# EAGLE library part MCP2515-TJA1050-MODULE (library moto-edge-hil)
MCP2515-TJA1050-MODULE MCP2515 + TJA1050 SPI CAN karti (8 MHz kristal). TJA1050 5V: Pi 3.3V SPI icin seviye dikkat. Kart: 40.0 x 28.0 mm - Guven: M STEP: GrabCAD 'MCP2515 CAN module' NOT: J1 jumper = 120R sonlandirma.
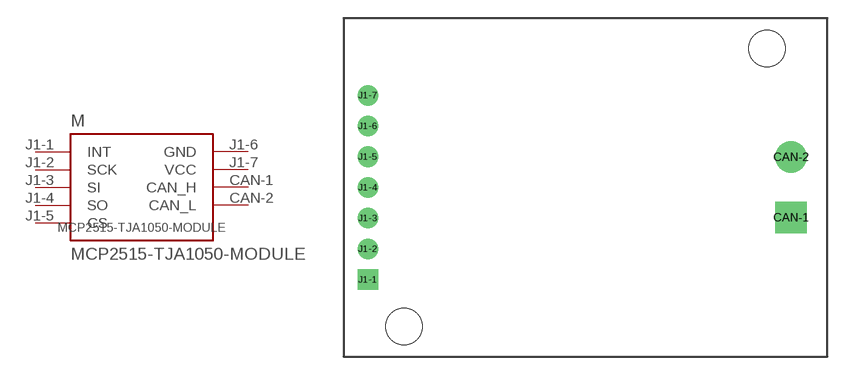
[diagram p1: symbol with the pads of MCP2515-TJA1050-MODULE; footprint MCP2515-TJA1050-MODULE]

Designator prefix M

## MCP2515-TJA1050-MODULE (BOARD_SIZE: 40.0x28.0mm; CONFIDENCE: M)  [MCP2515-TJA1050-MODULE]
CAN-1  CAN_H  pas
CAN-2  CAN_L  pas
J1-1  INT  pas
J1-2  SCK  pas
J1-3  SI  pas
J1-4  SO  pas
J1-5  CS  pas
J1-6  GND  pas
J1-7  VCC  pas

## Footprint MCP2515-TJA1050-MODULE (pad centres in mm)
MCP2515 + TJA1050 SPI CAN karti (8 MHz kristal). TJA1050 5V: Pi 3.3V SPI icin seviye dikkat. | Kart: 40.0 x 28.0 mm | Guven: M
drill 1.3 pad 2.6 square: CAN-1 17,-2.5
drill 1.3 pad 2.6 round: CAN-2 17,2.5
drill 1 pad 1.7 square: J1-1 -18,-7.62
drill 1 pad 1.7 round: J1-2 -18,-5.08; J1-3 -18,-2.54; J1-4 -18,0; J1-5 -18,2.54; J1-6 -18,5.08; J1-7 -18,7.62
hole 3 at -15,-11.5
hole 3 at 15,11.5